# EAGLE library part MCP6002 (library madhu)
Dual 1 MHz, Low-Power Op Amp Rail to rail input and output
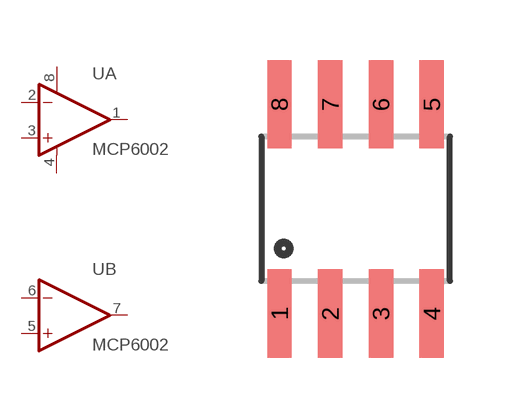
[diagram p50: symbol with the pads of SOIC-8; footprint SOIC-8]

Designator prefix U; gates A=OPAMP1 B=OPAMP2

## MCP6002T  [SOIC-8]
1  A:OUT  out
2  A:-IN  in
3  A:+IN  in
4  A:V-  pwr
5  B:+IN  in
6  B:-IN  in
7  B:OUT  out
8  A:V+  pwr

## Footprint SOIC-8 (pad centres in mm)
Small Outline Package Fits JEDEC packages (narrow SOIC-8)
smd 0.61 x 2.21: 1 -1.905,-2.616; 2 -0.635,-2.616; 3 0.635,-2.616; 4 1.905,-2.616; 5 1.905,2.616; 6 0.635,2.616; 7 -0.635,2.616; 8 -1.905,2.616